# Altium footprint library 固定柱.PcbLib: 140 footprints (part 7 of 9)
Each footprint in its own frame and in the unit in brackets; x right, y up, seen from the top. Pads: shape width x height; smd on the part's side, far side on the other; paste and mask are expansions set on the pad; w line width, h text height; cw(c..) or ccw(c..) is an arc to the next point about the centre after c.
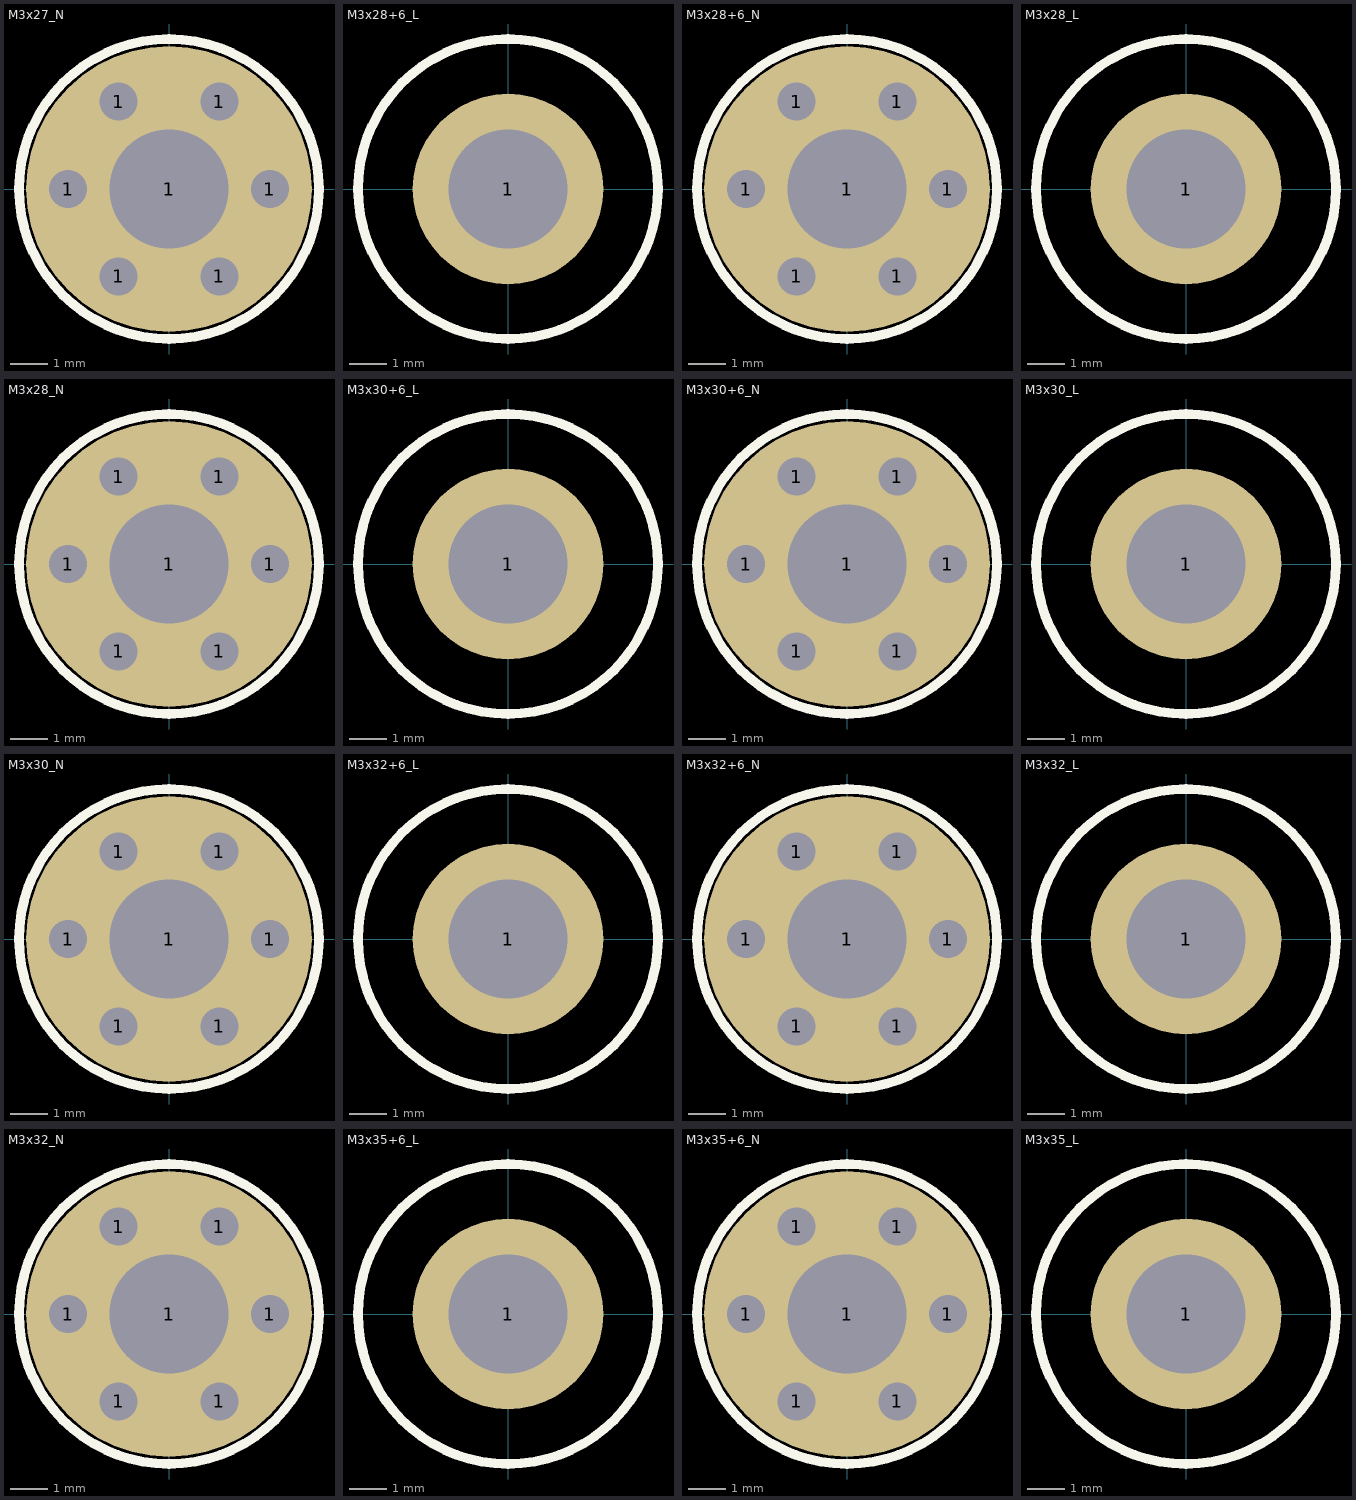
[diagram p6: the footprints below, top view; thin cyan lines are the x and y axes]

## M3x27_N [mil] "M3铜柱，长：27mm"
pads (7):
  round 40 hole 40: 1(-106,0) 1(-53,-91.8) 1(-53,91.8) 1(53,-91.8) 1(53,91.8) 1(106,0)
  round 300 hole 125: 1(0,0)
Top Overlay:
  circle w10: c0,0 r157.48
3D body "M3x27.STEP": height 1064.97, standoff 1.96, extent -106.22,-92.52 106.22,92.52

## M3x28+6_L [mil] "M3铜柱，长：28mm，螺纹长：6mm"
pads (1):
  round 200 hole 125: 1(0,0)
Top Overlay:
  circle w10: c0,0 r157.48
3D body "M3x28+6.STEP": height 1104.34, standoff -234.25, extent -106.22,-92.52 106.22,92.52

## M3x28+6_N [mil] "M3铜柱，长：28mm，螺纹长：6mm"
pads (7):
  round 40 hole 40: 1(-106,0) 1(-53,-91.8) 1(-53,91.8) 1(53,-91.8) 1(53,91.8) 1(106,0)
  round 300 hole 125: 1(0,0)
Top Overlay:
  circle w10: c0,0 r157.48
3D body "M3x28+6.STEP": height 1104.34, standoff -234.25, extent -106.22,-92.52 106.22,92.52

## M3x28_L [mil] "M3铜柱，长：28mm"
pads (1):
  round 200 hole 125: 1(0,0)
Top Overlay:
  circle w10: c0,0 r157.48
3D body "M3x28.STEP": height 1104.34, standoff 1.96, extent -106.22,-92.52 106.22,92.52

## M3x28_N [mil] "M3铜柱，长：28mm"
pads (7):
  round 40 hole 40: 1(-106,0) 1(-53,-91.8) 1(-53,91.8) 1(53,-91.8) 1(53,91.8) 1(106,0)
  round 300 hole 125: 1(0,0)
Top Overlay:
  circle w10: c0,0 r157.48
3D body "M3x28.STEP": height 1104.34, standoff 1.96, extent -106.22,-92.52 106.22,92.52

## M3x30+6_L [mil] "M3铜柱，长：30mm，螺纹长：6mm"
pads (1):
  round 200 hole 125: 1(0,0)
Top Overlay:
  circle w10: c0,0 r157.48
3D body "M3x30+6.STEP": height 1183.08, standoff -234.25, extent -106.22,-92.52 106.22,92.52

## M3x30+6_N [mil] "M3铜柱，长：30mm，螺纹长：6mm"
pads (7):
  round 40 hole 40: 1(-106,0) 1(-53,-91.8) 1(-53,91.8) 1(53,-91.8) 1(53,91.8) 1(106,0)
  round 300 hole 125: 1(0,0)
Top Overlay:
  circle w10: c0,0 r157.48
3D body "M3x30+6.STEP": height 1183.08, standoff -234.25, extent -106.22,-92.52 106.22,92.52

## M3x30_L [mil] "M3铜柱，长：30mm"
pads (1):
  round 200 hole 125: 1(0,0)
Top Overlay:
  circle w10: c0,0 r157.48
3D body "M3x30.STEP": height 1183.08, standoff 1.96, extent -106.22,-92.52 106.22,92.52

## M3x30_N [mil] "M3铜柱，长：30mm"
pads (7):
  round 40 hole 40: 1(-106,0) 1(-53,-91.8) 1(-53,91.8) 1(53,-91.8) 1(53,91.8) 1(106,0)
  round 300 hole 125: 1(0,0)
Top Overlay:
  circle w10: c0,0 r157.48
3D body "M3x30.STEP": height 1183.08, standoff 1.96, extent -106.22,-92.52 106.22,92.52

## M3x32+6_L [mil] "M3铜柱，长：32mm，螺纹长：6mm"
pads (1):
  round 200 hole 125: 1(0,0)
Top Overlay:
  circle w10: c0,0 r157.48
3D body "M3x32+6.STEP": height 1261.82, standoff -234.25, extent -106.22,-92.52 106.22,92.52

## M3x32+6_N [mil] "M3铜柱，长：32mm，螺纹长：6mm"
pads (7):
  round 40 hole 40: 1(-106,0) 1(-53,-91.8) 1(-53,91.8) 1(53,-91.8) 1(53,91.8) 1(106,0)
  round 300 hole 125: 1(0,0)
Top Overlay:
  circle w10: c0,0 r157.48
3D body "M3x32+6.STEP": height 1261.82, standoff -234.25, extent -106.22,-92.52 106.22,92.52

## M3x32_L [mil] "M3铜柱，长：32mm"
pads (1):
  round 200 hole 125: 1(0,0)
Top Overlay:
  circle w10: c0,0 r157.48
3D body "M3x32.STEP": height 1261.82, standoff 1.96, extent -106.22,-92.52 106.22,92.52

## M3x32_N [mil] "M3铜柱，长：32mm"
pads (7):
  round 40 hole 40: 1(-106,0) 1(-53,-91.8) 1(-53,91.8) 1(53,-91.8) 1(53,91.8) 1(106,0)
  round 300 hole 125: 1(0,0)
Top Overlay:
  circle w10: c0,0 r157.48
3D body "M3x32.STEP": height 1261.82, standoff 1.96, extent -106.22,-92.52 106.22,92.52

## M3x35+6_L [mil] "M3铜柱，长：35mm，螺纹长：6mm"
pads (1):
  round 200 hole 125: 1(0,0)
Top Overlay:
  circle w10: c0,0 r157.48
3D body "M3x35+6.STEP": height 1379.94, standoff -234.25, extent -106.22,-92.52 106.22,92.52

## M3x35+6_N [mil] "M3铜柱，长：35mm，螺纹长：6mm"
pads (7):
  round 40 hole 40: 1(-106,0) 1(-53,-91.8) 1(-53,91.8) 1(53,-91.8) 1(53,91.8) 1(106,0)
  round 300 hole 125: 1(0,0)
Top Overlay:
  circle w10: c0,0 r157.48
3D body "M3x35+6.STEP": height 1379.94, standoff -234.25, extent -106.22,-92.52 106.22,92.52

## M3x35_L [mil] "M3铜柱，长：35mm"
pads (1):
  round 200 hole 125: 1(0,0)
Top Overlay:
  circle w10: c0,0 r157.48
3D body "M3x35.STEP": height 1379.93, standoff 1.96, extent -106.22,-92.52 106.22,92.52